# Altium footprint library TMJD4012BENL.PcbLib: 1 footprints
Each footprint in its own frame and in the unit in brackets; x right, y up, seen from the top. Pads: shape width x height; smd on the part's side, far side on the other; paste and mask are expansions set on the pad; w line width, h text height; cw(c..) or ccw(c..) is an arc to the next point about the centre after c.
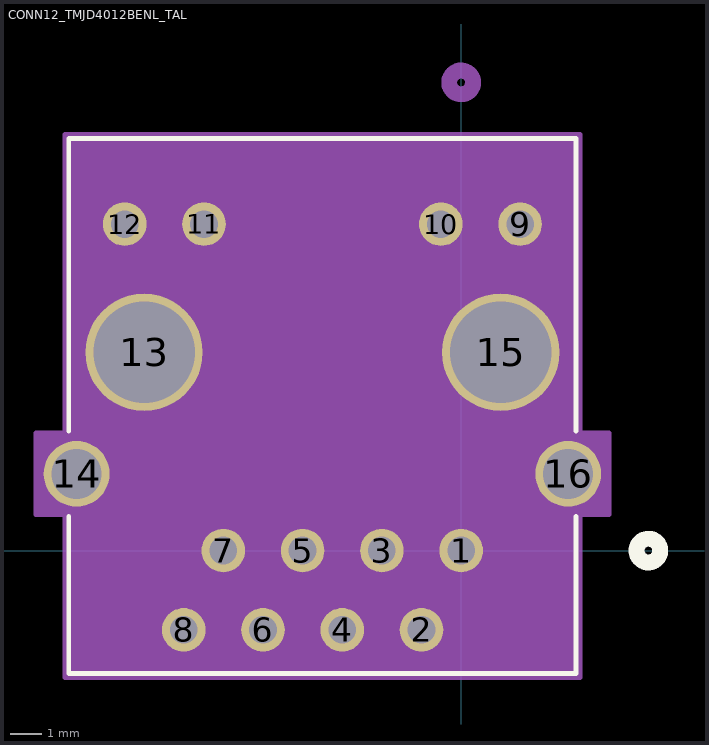
[diagram p0: the footprint, top view; thin cyan lines are the x and y axes]

## CONN12_TMJD4012BENL_TAL [mil]
pads (16):
  round 55 hole 35 paste-27.5 mask+0: 1(0,0) 2(-50,-100) 3(-100,0) 4(-150,-100) 5(-200,0) 6(-250,-100) 7(-300,0) 8(-350,-100) 9(74.41,411.81) 10(-25.59,411.81) 11(-324.41,411.81) 12(-424.41,411.81)
  round 148 hole 128 paste-74 mask-74: 13(-400,250) 15(50,250)
  round 83 hole 63 paste-41.5 mask-41.5: 14(-485.04,96.85) 16(135.04,96.85)
Top Overlay:
  circle w20: c236.22,0 r15
  lines w6: -495,-91.87 -495,-155.04 ; -495,15.49 -495,43.17 -495,-155.04 ; -365.29,519.96 -495,519.96 ; -284.71,519.96 -265.29,519.96 ; -184.71,519.96 -165.29,519.96 ; -84.71,519.96 -65.29,519.96 ; 15.29,519.96 145,519.96 ; 145,-91.87 145,-155.04 ; 145,15.49 145,43.17 145,-155.04 ; -495,-155.04 145,-155.04 ; -495,-155.04 145,-155.04 ; -495,519.96 145,519.96 ; -495,519.96 -495,150.53 -495,519.96 ; 145,519.96 145,150.53 145,519.96
  text ".Designator" at -312.5,389.96 h50
Bottom Overlay:
  circle w20: c251.22,0 r15
Mechanical 13:
  circle w20: c0,590.55 r15
  lines w1: -490,-150.04 140,-150.04 140,514.96 -490,514.96 -490,-150.04
  text ".Designator" at -312.5,389.96 h50
Mechanical 15:
  region: -536.54,45.35 -500,45.35 -500,-160.04 150,-160.04 150,45.35 186.54,45.35 186.54,148.35 150,148.35 150,524.96 -500,524.96 -500,148.35 -536.54,148.35
  lines w6: -536.54,45.35 -500,45.35 -500,-160.04 150,-160.04 150,45.35 186.54,45.35 186.54,148.35 150,148.35 150,524.96 -500,524.96 -500,148.35 -536.54,148.35 -536.54,45.35